# Altium integrated library TSM-104-01-L-MT.IntLib: 1 symbol
Pins are listed as number, name and electrical type; pins without a type are passive.

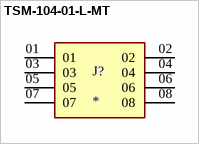
[diagram p0: symbol TSM-104-01-L-MT]

## TSM-104-01-L-MT
designator J?
TSM Series .100 Surface Mount Terminal Strip; MF: Samtec; MP: TSM-104-01-L-MT; SnapEDA_Link: https://www.snapeda.com/parts/TSM-104-01-L-MT/Samtec/view-part/?ref=snap; Package: None; Value: *; Check_prices: https://www.snapeda.com/parts/TSM-104-01-L-MT/Samtec/view-part/?ref=eda
footprint SAMTEC_TSM-104-01-L-MT
pins: 01, 02, 03, 04, 05, 06, 07, 08